# Altium footprint library Capacitance.PcbLib: 69 footprints (part 4 of 5)
Each footprint in its own frame and in the unit in brackets; x right, y up, seen from the top. Pads: shape width x height; smd on the part's side, far side on the other; paste and mask are expansions set on the pad; w line width, h text height; cw(c..) or ccw(c..) is an arc to the next point about the centre after c.
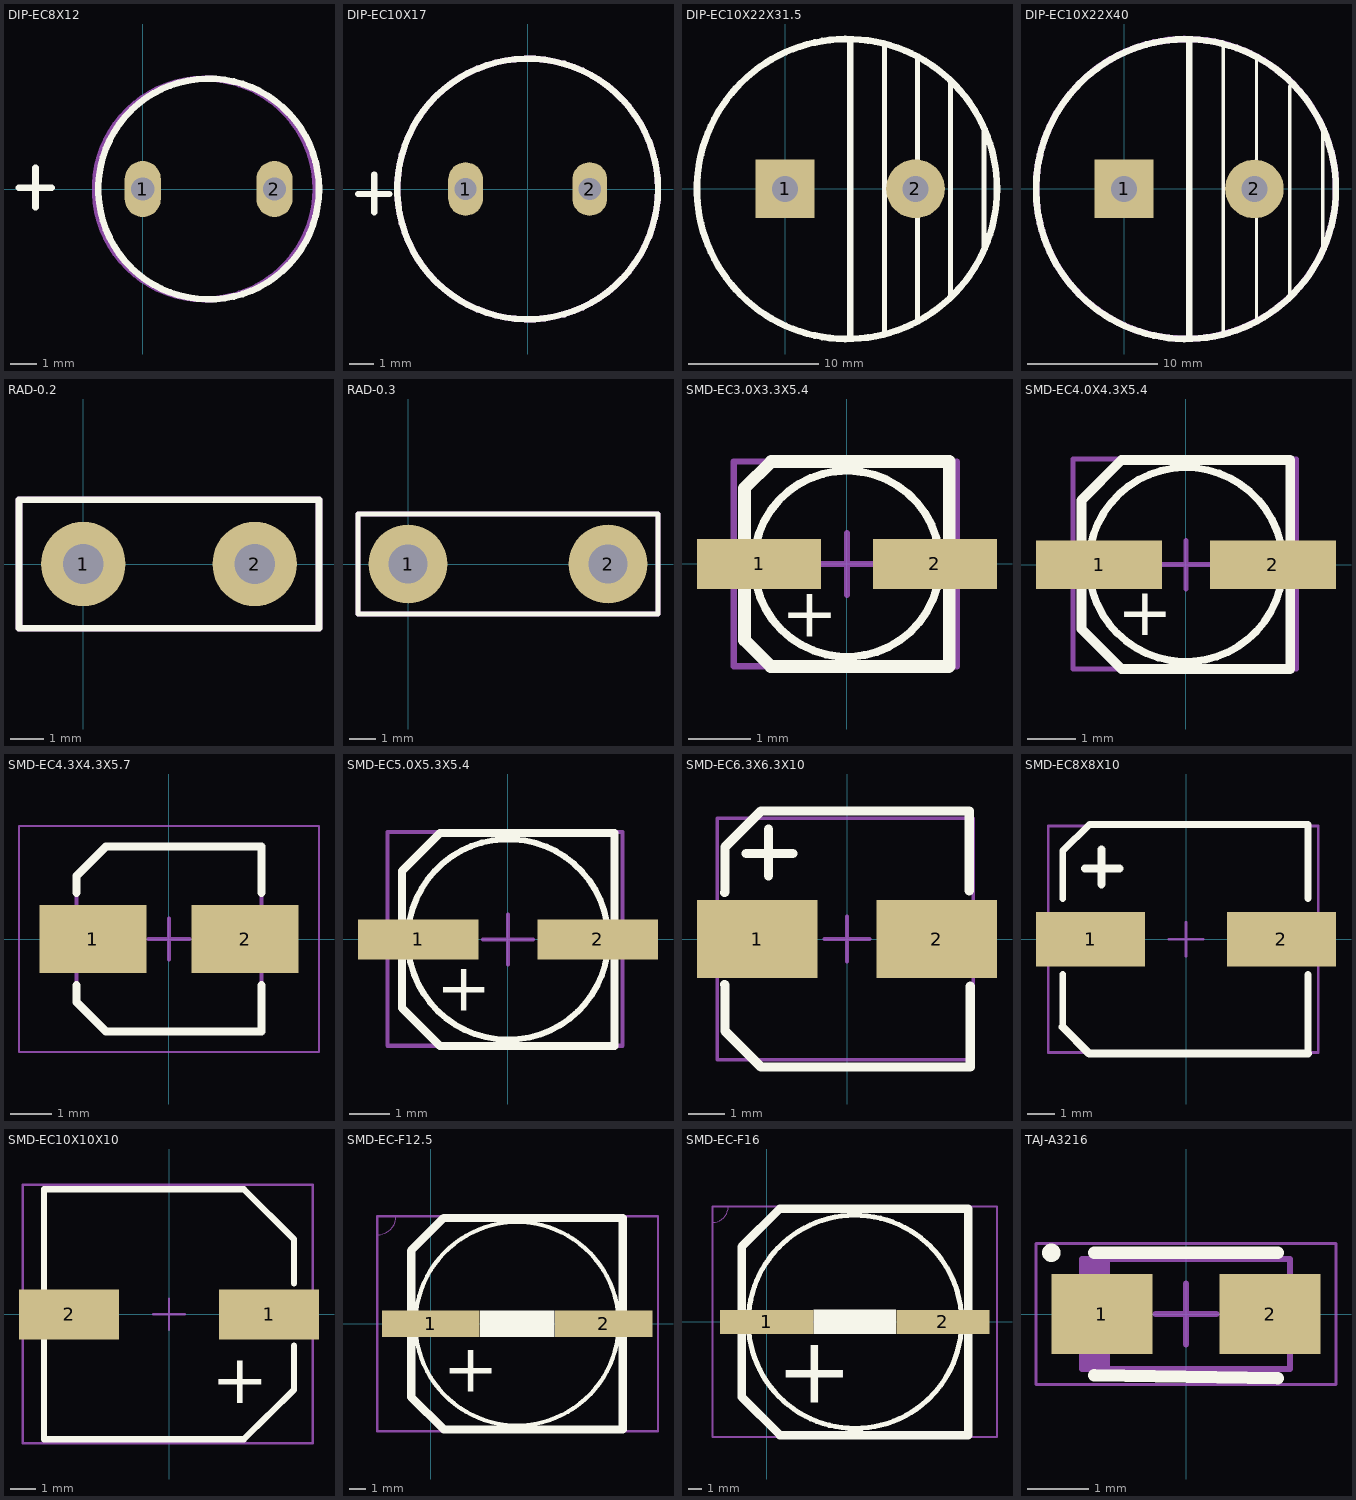
[diagram p3: the footprints below, top view; thin cyan lines are the x and y axes]

## DIP-EC8X12 [mil]
pads (2):
  oval 55x85 hole 35.43: 1(0,0) 2(200,0)
Top Overlay:
  circle w10: c100,0 r167.61
  lines w10: -187.94,2 -137.94,2 ; -162.94,-28 -162.94,32
Bottom Courtyard:
  circle w10: c95,0 r167.61
  text ".Designator" at 339.74,-19.99 h60
3D body "CAP_R150_D320_H570(8×14).STEP": height 566.93, standoff -114.17, extent -61.41,-161.41 261.42,161.42

## DIP-EC10X17 [mm]
pads (2):
  oval 1.397x2.159 hole 0.9: 1(-2.5,0) 2(2.5,0)
Top Overlay:
  circle w0.254: c0,0 r5.25
  lines w0.254: -6.833,-0.203 -5.563,-0.203 ; -6.172,-0.94 -6.172,0.584
Bottom Courtyard:
  circle w0.254: c0,0 r5.25
  text ".Designator" at 6.826,-0.508 h1.52
3D body "Cap_D80H115.STEP": height 13, standoff -3, extent -4.148,-4.542 4.315,3.932

## DIP-EC10X22X31.5 [mm]
pads (2):
  rect 4.5x4.5 hole 2: 1(0,0)
  round 4.5 hole 2: 2(10,0)
Top Overlay:
  circle w0.508: c4.752,-0.013 r11.5
  lines w0.381: 7.62,-10.922 7.62,10.922 ; 10.16,-10.16 10.16,10.16 ; 12.7,-8.128 12.7,8.128 ; 15.24,-4.572 15.24,4.572
  lines w0.508: 5,-11.25 5,11.25
Bottom Courtyard:
  text ".Designator" at 12.369,-0.521 h1.52
3D body "CAP 10X22X31.5.STEP": height 31.53, standoff -3.38, extent -5.969,-10.996 16.041,10.996

## DIP-EC10X22X40 [mm]
pads (2):
  rect 4.5x4.5 hole 2: 1(0,0)
  round 4.5 hole 2: 2(10,0)
Top Overlay:
  circle w0.508: c4.752,-0.013 r11.5
  lines w0.254: 7.62,-11.176 7.62,10.922 ; 10.16,-9.906 10.16,10.16 ; 12.7,-8.382 12.7,7.874 ; 15.24,-4.572 15.24,4.318
  lines w0.508: 5,-11.25 5,11.25
Bottom Courtyard:
  circle w0.508: c4.752,0 r11.5
  text ".Designator" at 12.369,-0.514 h1.52
3D body "CAP 10X22X40.STEP": height 40.03, standoff -3.38, extent -6.005,-10.949 16.005,11.049

## RAD-0.2 [mm]
pads (2):
  round 2.5 hole 1.2: 1(0,0) 2(5.08,0)
Top Overlay:
  lines w0.2: -1.905,-1.905 6.985,-1.905 6.985,1.905 -1.905,1.905 -1.905,-1.905
Bottom Courtyard:
  lines w0.2: -1.905,-1.905 -1.905,1.905 6.985,1.905 6.985,-1.905 -1.905,-1.905
  text ".Designator" at 10.158,-0.508 h1.52
3D body "User Library-Ceramic Disc Capacitor 0_2in pitch.STEP": height 7.06, standoff -1.44, extent -0.959,-0.848 6.04,0.848

## RAD-0.3 [mm]
pads (2):
  round 3 hole 1.5: 1(0,0) 2(7.62,0)
Top Overlay:
  lines w0.2: -1.905,-1.905 9.525,-1.905 9.525,1.905 -1.905,1.905 -1.905,-1.905
Bottom Courtyard:
  lines w0.2: -1.905,-1.905 -1.905,1.905 9.525,1.905 9.525,-1.905 -1.905,-1.905
  text ".Designator" at 11.555,-0.468 h1.52
3D body "User Library-Capacitor MKT_B32591C3104 (Pitch 10mm).STEP": height 11.5, standoff -7, extent -2.563,-2.46 10.437,2.54

## SMD-EC3.0X3.3X5.4 [mm]
pads (2):
  rect 2x0.8 smd: 1(-1.417,0) 2(1.417,0)
Top Overlay:
  lines w0.127: 1.359,0.636 ccw(c-0.001,0.003) 1.36,0.634
  lines w0.203: -1.227,1.646 -1.652,1.222 -1.652,-1.229 -1.227,-1.653 1.642,-1.653 ; -1.222,1.651 1.648,1.651 1.648,-1.647
  text "+" at -1.057,-1.174 h0.8
Top Component Outline:
  lines w0.1: -1.825,-1.65 -1.825,1.65 1.775,1.65 1.775,-1.65 -1.825,-1.65
Top Component Center:
  lines w0.1: -0.5,0 0.5,0 ; 0,-0.5 0,0.5
Top Value:
  text "'.Comment'" at -1.928,-0.266 h0.89
Top Designator:
  text "'.Designator'" at -2.917,-0.396 h1.02
3D body "ALU-A_3.0x3.3x5.4.STEP": height 5.4, standoff 0, extent -1.825,-1.65 1.775,1.65

## SMD-EC4.0X4.3X5.4 [mm]
pads (2):
  rect 2.6x1 smd: 1(-1.789,0) 2(1.789,0)
Top Overlay:
  lines w0.152: 1.771,0.924 ccw(c-0.003,0) 1.773,0.921
  lines w0.203: 2.147,2.151 -1.328,2.151 -2.154,1.325 -2.154,-1.324 -1.328,-2.15 2.147,-2.15 2.147,2.15
  text "+" at -1.419,-1.46 h1
Top Component Outline:
  lines w0.1: -2.325,-2.15 2.275,-2.15 2.275,2.175 -2.325,2.175 -2.325,-2.15
Top Component Center:
  lines w0.1: -0.5,0 0.5,0 ; 0,-0.5 0,0.5
Top Value:
  text "'.Comment'" at -2.202,-0.304 h1.02
Top Designator:
  text "'.Designator'" at -3.28,-0.446 h1.14
3D body "ALU-B_4.0x4.3x5.4.STEP": height 5.4, standoff 0, extent -2.325,-2.15 2.275,2.15

## SMD-EC4.3X4.3X5.7 [mm] "Aluminum Electrolytic Capacitor, Body 4.30x4.30x5.70mm, IPC Medium Density"
height 5.7
pads (2):
  rect 2.6x1.65 smd: 1(-1.85,0) 2(1.85,0)
Top Overlay:
  lines w0.2: -2.25,-1.125 -2.25,-1.538 -1.538,-2.25 2.25,-2.25 2.25,-1.125 ; -2.25,1.125 -2.25,1.538 -1.538,2.25 2.25,2.25 2.25,1.125
Top Courtyard:
  lines w0.05: -3.65,-2.75 -3.65,2.75 3.65,2.75 3.65,-2.75 -3.65,-2.75
  lines w0.1: -0.5,0 0.5,0 ; 0,-0.5 0,0.5
Top Assembly:
  lines w0.1: -2.25,-1.538 -1.538,-2.25 2.25,-2.25 2.25,2.25 -1.538,2.25 -2.25,1.538 -2.25,-1.538
3D body "ALU-B_4.0x4.3x5.4.STEP": height 5.4, standoff 0, extent -2.325,-2.15 2.275,2.15

## SMD-EC5.0X5.3X5.4 [mm]
pads (2):
  rect 3x1 smd: 1(-2.238,0) 2(2.238,0)
Top Overlay:
  lines w0.152: 2.174,1.239 ccw(c0.003,0) 2.176,1.235
  lines w0.203: -2.021,-2.33 -2.645,-1.706 ; 2.651,2.656 -1.696,2.656 ; 2.653,-2.654 2.653,2.654 ; 2.653,-2.654 -1.696,-2.654 -1.697,-2.654 -2.645,-1.706 ; -2.645,-1.706 -2.645,1.707 -1.697,2.655 ; -1.697,2.655 -1.696,2.656
  text "+" at -1.794,-1.777 h1.2
Top Component Outline:
  lines w0.1: -3,-2.65 -3,2.675 2.85,2.675 2.85,-2.65 -3,-2.65
Top Component Center:
  lines w0.1: -0.625,0 0.625,0 ; 0,-0.625 0,0.625
Top Value:
  text "'.Comment'" at -2.202,-0.304 h1.02
Top Designator:
  text "'.Designator'" at -3.28,-0.446 h1.14
3D body "ALU-C_5.0x5.3x5.4.STEP": height 5.41, standoff 0, extent -3.025,-2.65 2.875,2.65

## SMD-EC6.3X6.3X10 [mm]
pads (2):
  rect 3.3x2.132 smd: 1(-2.45,0) 2(2.45,0)
Top Overlay:
  lines w0.008: -3.35,-1.245 -3.285,-1.31 -3.285,-2.565 -2.35,-3.5 3.365,-3.5
  lines w0.254: -3.35,-1.245 -3.335,-1.259 -3.335,-2.515 -2.35,-3.5 3.355,-3.5 3.365,-3.49 ; -3.35,1.27 -3.335,1.285 -3.335,2.515 -2.35,3.5 3.34,3.5 3.34,1.321 ; -2.756,2.337 -1.486,2.337 ; -2.147,1.727 -2.147,2.997 ; 3.365,-3.5 3.365,-1.295
Top Component Outline:
  lines w0.1: -3.55,-3.3 -3.55,3.3 3.45,3.3 3.45,-3.3 -3.55,-3.3
Top Component Center:
  lines w0.1: -0.625,0 0.625,0 ; 0,-0.625 0,0.625
Top Value:
  text "'.Comment'" at -2.476,-0.342 h1.14
Top Designator:
  text "'.Designator'" at -3.642,-0.495 h1.27
3D body "ALU-D_6.3x6.6x5.4.STEP": height 5.4, standoff 0, extent -3.558,-3.3 3.442,3.3

## SMD-EC8X8X10 [mm]
pads (2):
  rect 4x2 smd: 1(-3.5,0) 2(3.5,0)
Top Overlay:
  lines w0.254: -4.52,-1.295 -4.52,-3.222 -3.551,-4.191 4.476,-4.191 4.476,-1.295 ; -4.52,1.499 -4.52,3.235 -3.546,4.209 4.476,4.209 4.476,1.499
  lines w0.3: -4.52,-3.217 -4.52,-3.222 -3.551,-4.191 4.476,-4.191 ; -3.703,2.6 -2.433,2.6 ; -3.094,2.016 -3.094,3.286
Top Component Outline:
  lines w0.1: -5.05,-4.15 4.85,-4.15 4.85,4.15 -5.05,4.15 -5.05,-4.15
Top Component Center:
  lines w0.1: -0.625,0 0.625,0 ; 0,-0.625 0,0.625
Top Value:
  text "'.Comment'" at -2.476,-0.342 h1.14
Top Designator:
  text "'.Designator'" at -3.642,-0.495 h1.27
3D body "ALU-F_8.0x8.3x10.2.STEP": height 10.2, standoff 0, extent -5.05,-4.175 4.85,4.125

## SMD-EC10X10X10 [mm]
pads (2):
  rect 4x2 smd: 1(4,0) 2(-4,0)
Top Overlay:
  lines w0.254: -5,-1.295 -5,-5.004 ; -5,1.295 -5,5.004 ; 0,-5.004 -5,-5.004 ; 4.999,-1.245 4.999,-3.023 2.997,-5.004 -5,-5.004 ; 4.999,1.245 4.999,3.004 2.997,5.004 -5,5.004 ; -5,-5.004 -5,5.004
  text "+" at 3.988,-1.854 h2
Top Component Outline:
  lines w0.1: -5.85,-5.15 -5.85,5.175 5.75,5.175 5.75,-5.15 -5.85,-5.15
Top Component Center:
  lines w0.1: -0.625,0 0.625,0 ; 0,-0.625 0,0.625
Top Value:
  text "'.Comment'" at -2.476,-0.342 h1.14
Top Designator:
  text "'.Designator'" at -3.642,-0.495 h1.27
3D body "ALU-G_10.0x10.3x10.2.STEP": height 10.2, standoff 0, extent -5.864,-5.12 5.736,5.18

## SMD-EC-F12.5 [mm]
pads (2):
  rect 6x1.6 smd: 1(0,0) 2(10.625,0)
Top Overlay:
  circle w0.254: c5.303,0 r6.25
  rectangle: 3.019,-0.8 7.601,0.8
  lines w0.508: -1.202,-4.498 0.799,-6.499 11.797,-6.499 11.797,6.495 0.799,6.495 0.797,6.493 -1.202,4.494 -1.202,-4.498
  text "+" at 0.75,-4.168 h3
Bottom Courtyard:
  lines w0.051: -3.302,5.461 ccw(c-3.302,6.632) -2.131,6.632
  lines w0.152: -3.302,-6.604 13.97,-6.604 13.97,6.604 -3.302,6.604 -3.302,-6.604
  text ".Designator" at 12.952,-0.51 h1.52

## SMD-EC-F16 [mm]
pads (2):
  rect 7x1.8 smd: 1(0,0) 2(13.215,0)
Top Overlay:
  rectangle: 3.503,-0.9 9.696,0.914
  lines w0.381: 14.301,2.24 ccw(c6.62,0.001) 14.315,2.19
  lines w0.635: 15.122,-8.499 15.123,-8.5 ; 15.122,8.496 15.123,8.497 ; 15.123,-8.5 0.981,-8.5 -1.877,-5.642 -1.877,5.638 0.981,8.497 15.123,8.497 ; 15.123,-8.5 15.123,8.497
  text "+" at 0.729,-6.087 h5
Bottom Courtyard:
  lines w0.051: -4.064,7.465 ccw(c-4.064,8.636) -2.893,8.636
  lines w0.152: -4.064,-8.636 -4.064,8.636 17.272,8.636 17.272,-8.636 -4.064,-8.636
  text ".Designator" at 14.222,-0.509 h1.52

## TAJ-A3216 [mm] "Molded Capacitor, 2-Leads, Body 3.20x1.65mm, IPC Medium Density"
height 1.6
pads (2):
  rect 1.65x1.3 smd: 1(-1.375,0) 2(1.375,0)
Top Overlay:
  circle w0.2: c-2.2,1 r0.05
  lines w0.2: -1.5,-1 1.5,-1.05 ; -1.5,1 1.5,1
Top Value:
  text "'.Comment'" at -3.449,-0.465 h1.6
Top Designator:
  text "'.Designator'" at -4.573,-0.334 h1.6
Top Courtyard:
  lines w0.05: -2.45,-1.15 -2.45,1.15 2.45,1.15 2.45,-1.15 -2.45,-1.15
  lines w0.1: -0.5,0 0.5,0 ; 0,-0.5 0,0.5
Top Assembly:
  rectangle: -1.7,-0.9 -1.243,0.9
  lines w0.1: -1.7,-0.9 1.7,-0.9 1.7,0.9 -1.7,0.9 -1.7,-0.9
3D body "TAJ-A.STEP": height 1.6, standoff 0, extent -1.625,-0.8 1.575,0.8